# Altium footprint library AVP32F335_EVM_Rev1.0.PcbLib: 50 footprints (part 2 of 4)
Each footprint in its own frame and in the unit in brackets; x right, y up, seen from the top. Pads: shape width x height; smd on the part's side, far side on the other; paste and mask are expansions set on the pad; w line width, h text height; cw(c..) or ccw(c..) is an arc to the next point about the centre after c.
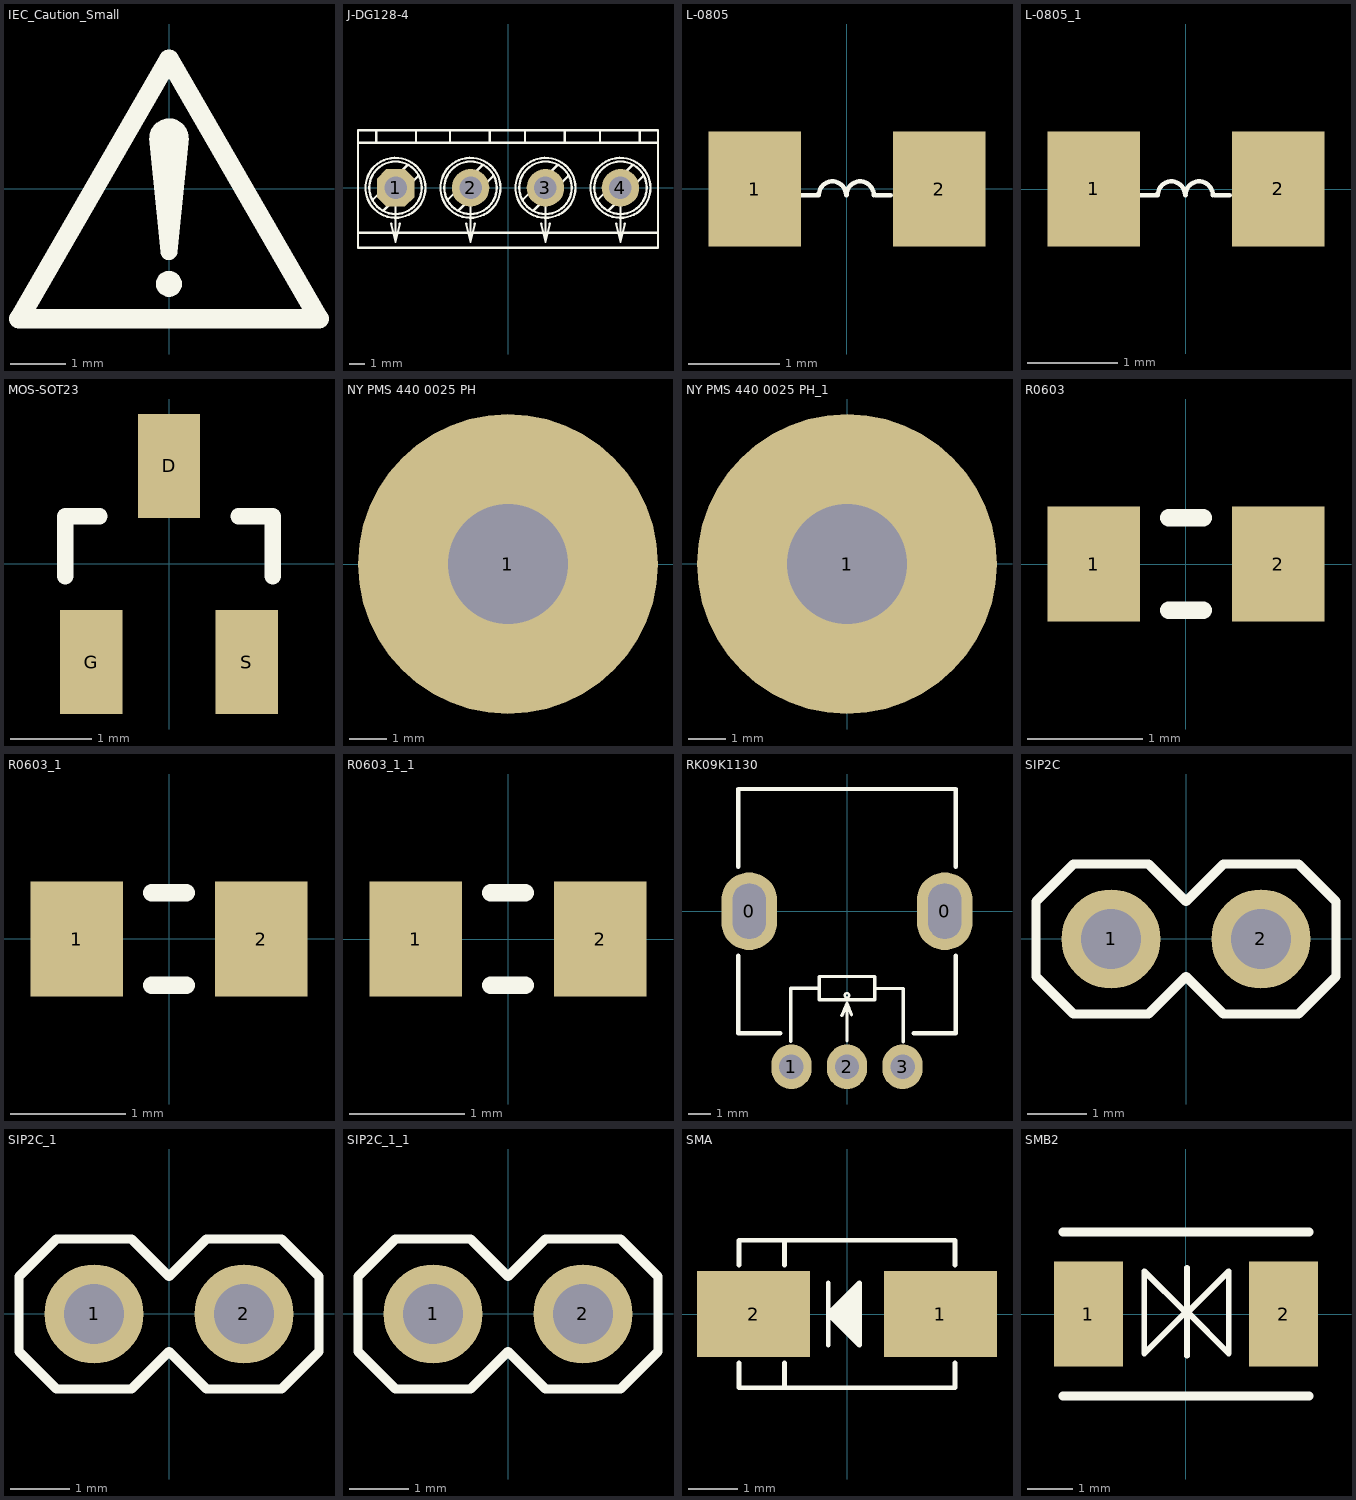
[diagram p1: the footprints below, top view; thin cyan lines are the x and y axes]

## IEC_Caution_Small [mm]
Top Overlay:
  circle w0.254: c0,-1.727 r0.108
  circle w0.356: c0,0.914 r0.178
  circle w0.254: c0,-1.143 r0.025
  region: -0.356,0.914 0.356,0.914 0.152,-1.143 -0.152,-1.143
  lines w0.356: -2.718,-2.362 0,2.345 2.718,-2.362 -2.718,-2.362

## J-DG128-4 [mm]
pads (4):
  oct 2.5x2.5 hole 1.5: 1(-7.5,0)
  round 2.5 hole 1.5: 2(-2.5,0) 3(2.5,0) 4(7.5,0)
Top Overlay:
  circle w0.15: c7.5,0 r2
  circle w0.15: c7.5,0 r1.75
  circle w0.15: c2.5,0 r1.75
  circle w0.15: c2.5,0 r2
  circle w0.15: c-7.5,0 r1.75
  circle w0.15: c-7.5,0 r2
  circle w0.15: c-2.5,0 r1.75
  circle w0.15: c-2.5,0 r2
  lines w0.15: -10,-3 10,-3 ; -10,3 10,3 ; -9.013,-0.791 -6.702,1.52 ; -8.781,3 -8.781,3.839 ; -8.298,-1.52 -5.987,0.791 ; -7.79,-2.389 -7.5,-3.594 ; -7.5,0 -7.5,-3.594 ; -7.21,-2.389 -7.5,-3.594 ; -6.139,3 -6.139,3.839 ; -4.013,-0.791 -1.702,1.52 ; -3.861,3 -3.861,3.839 ; -3.298,-1.52 -0.987,0.791 ; -2.79,-2.389 -2.5,-3.594 ; -2.5,0 -2.5,-3.594 ; -2.21,-2.389 -2.5,-3.594 ; -1.219,3 -1.219,3.839 ; 0.987,-0.791 3.298,1.52 ; 1.139,3 1.139,3.839 ; 1.702,-1.52 4.013,0.791 ; 2.21,-2.389 2.5,-3.594 ; 2.5,0 2.5,-3.594 ; 2.79,-2.389 2.5,-3.594 ; 3.781,3 3.781,3.839 ; 5.987,-0.791 8.298,1.52 ; 6.139,3 6.139,3.839 ; 6.702,-1.52 9.013,0.791 ; 7.21,-2.389 7.5,-3.594 ; 7.5,0 7.5,-3.594 ; 7.79,-2.389 7.5,-3.594 ; 8.781,3 8.781,3.839 ; -10,-4 -10,3.839 10,3.839 10,-4 -10,-4
3D body "SW3dPS-KRM4.STEP": height 10, standoff -4, extent -10,-3.586 10,3.914

## L-0805 [mil] "标准型  间距40mil 电感"
height 196.85
pads (2):
  rect 40x50 smd: 1(-40,0) 2(40,0)
Top Overlay:
  lines w1.97: -20,-2.61 -13,-2.61 ; -12.22,-2.62 cw(c-6.32,-2.62) -0.41,-2.62 ; -0.22,-2.62 cw(c5.68,-2.62) 11.59,-2.62 ; 12.53,-2.61 19,-2.61
3D body "User Library-Ferrite Beads(BLM21PG221SZ1D).step": height 36.42, standoff 2.95, extent -39.36,-25.6 39.37,23.61

## L-0805_1 [mil] "标准型  间距40mil 电感"
height 196.85
pads (2):
  rect 40x50 smd: 1(-40,0) 2(40,0)
Top Overlay:
  lines w1.97: -20,-2.61 -13.01,-2.61 ; -12.22,-2.62 cw(c-6.32,-2.62) -0.41,-2.62 ; -0.22,-2.62 cw(c5.68,-2.62) 11.59,-2.62 ; 12.53,-2.61 19,-2.61
3D body "User Library-Ferrite Beads(BLM21PG221SZ1D).step": height 36.42, standoff 2.95, extent -39.37,-25.6 39.37,23.61

## MOS-SOT23 [mm] "焊盘加长型"
height 2
pads (3):
  rect 0.762x1.27 smd: D(0,1.2) G(-0.95,-1.2) S(0.95,-1.2)
Top Overlay:
  lines w0.2: -1.27,-0.15 -1.27,0.584 -0.85,0.584 ; 0.85,0.584 1.27,0.584 1.27,-0.15
3D body "SOT-23-3.STEP": height 1.2, standoff 0, extent -1.45,-1.502 1.45,1.298

## NY PMS 440 0025 PH [mm] "4-40 nylon screw and mounting hole"
height 1.905
pads (1):
  round 8 hole 3.2: 1(12,0)

## NY PMS 440 0025 PH_1 [mm] "4-40 nylon screw and mounting hole"
height 1.905
pads (1):
  round 8 hole 3.2: 1(0,0)
Mechanical 5:
  circle w0.127: c0,0 r3.789
3D body: height 2.69, standoff -8.74, extent -3.302,-3.3 3.296,3.3

## R0603 [mm] "无丝印 脚距1.6mm  0.8/1mm 焊盘"
height 1.2
pads (2):
  rect 0.8x1 smd mask+0.051: 1(-0.8,0) 2(0.8,0)
Top Overlay:
  lines w0.152: -0.15,-0.4 0.15,-0.4 ; -0.15,0.4 0.15,0.4
3D body "RES-0603.step": height 0.43, standoff -0.03, extent -0.786,-0.4 0.814,0.4

## R0603_1 [mm] "无丝印 脚距1.6mm  0.8/1mm 焊盘"
height 1.2
pads (2):
  rect 0.8x1 smd: 1(-0.8,0) 2(0.8,0)
Top Overlay:
  lines w0.152: -0.15,-0.4 0.15,-0.4 ; -0.15,0.4 0.15,0.4
3D body "RES-0603.step": height 0.43, standoff -0.03, extent -0.786,-0.4 0.814,0.4

## R0603_1_1 [mm] "无丝印 脚距1.6mm  0.8/1mm 焊盘"
height 1.2
pads (2):
  rect 0.8x1 smd: 1(-0.8,0) 2(0.8,0)
Top Overlay:
  lines w0.152: -0.15,-0.4 0.15,-0.4 ; -0.15,0.4 0.15,0.4
3D body "RES-0603.step": height 0.43, standoff -0.03, extent -0.786,-0.4 0.814,0.4

## RK09K1130 [mm] "立式可调电位器"
height 9.5
pads (5):
  oval 2.5x3.5 hole 1.5 slot 2.5 at 90 deg: 0(-4.4,0) 0(4.4,0)
  oval 1.8x2 hole 1.1: 1(-2.5,-7) 2(0,-7) 3(2.5,-7)
Top Overlay:
  circle w0.1: c-0.002,-3.784 r0.1
  lines w0.15: -2.525,-5.857 -2.525,-3.469 -1.247,-3.469 -1.247,-2.941 1.243,-2.941 1.243,-3.982 -1.247,-3.982 -1.247,-3.474 ; -0.231,-4.693 -0.002,-4.135 ; -0.002,-5.836 -0.002,-4.135 ; 0.201,-4.668 -0.002,-4.135 ; 1.243,-3.474 2.538,-3.474 ; 2.529,-5.882 2.529,-3.495
  lines w0.2: -4.9,-2 -4.9,-5.5 -3,-5.5 ; -4.9,2 -4.9,5.5 4.863,5.5 4.877,5.486 4.886,5.486 4.9,5.5 4.9,2 ; 3,-5.5 4.9,-5.5 4.9,-2
3D body "User Library-RK09K1130-20-1.step": height 19.5, standoff -4.2, extent -5.698,-7.152 5.698,5.498

## SIP2C [mil] "带短路帽"
height 47.24
pads (2):
  round 66 hole 40 paste-4: 1(-50,0) 2(50,0)
Top Overlay:
  lines w6: -100,-25 -75,-50 -25,-50 0,-25 25,-50 75,-50 100,-25 100,25 75,50 25,50 0,25 -25,50 -75,50 -100,25 -100,-25
Mechanical 16:
  rectangle: -60,-10 -40,10
  rectangle: 40,-10 60,10
3D body "User Library-PLD-2.step": height 336.22, standoff -118.11, extent -100,-50 100,50
3D body "SNT-100-XX-X.stp": height 344, standoff 104, extent -100,-52.1 100,48

## SIP2C_1 [mil] "带短路帽"
height 47.24
pads (2):
  round 66 hole 40: 1(-50,0) 2(50,0)
Top Overlay:
  lines w6: -100,-25 -100,25 -75,50 -25,50 0,25 25,50 75,50 100,25 100,-25 75,-50 25,-50 0,-25 -25,-50 -75,-50 -100,-25
Mechanical 16:
  rectangle: 40,-10 60,10
  rectangle: -60,-10 -40,10
3D body "SNT-100-XX-X.stp": height 344, standoff 104, extent -100,-52.1 100,48
3D body "User Library-PLD-2.step": height 336.22, standoff -118.11, extent -100,-50 100,50

## SIP2C_1_1 [mil] "带短路帽"
height 47.24
pads (2):
  round 66 hole 40: 1(-50,0) 2(50,0)
Top Overlay:
  lines w6: -100,-25 -100,25 -75,50 -25,50 0,25 25,50 75,50 100,25 100,-25 75,-50 25,-50 0,-25 -25,-50 -75,-50 -100,-25
Mechanical 16:
  rectangle: 40,-10 60,10
  rectangle: -60,-10 -40,10
3D body "SNT-100-XX-X.stp": height 344, standoff 104, extent -100,-52.1 100,48
3D body "User Library-PLD-2.step": height 336.22, standoff -118.11, extent -100,-50 100,50

## SMA [mm] "DO-214AC"
height 8
pads (2):
  rect 2.3x1.75 smd: 1(1.9,0) 2(-1.9,0)
Top Overlay:
  lines w0.1: -2.2,-1 -2.2,-1.5 2.2,-1.5 2.2,-1 ; -2.2,1 -2.2,1.5 2.2,1.5 2.2,1 ; -1.27,-1.5 -1.27,-1 ; -1.27,1 -1.27,1.5 ; -0.381,-0.635 -0.381,0.635 ; -0.381,-0.025 -0.087,-0.025 ; -0.381,0.051 0.071,0.051 ; -0.193,-0.188 -0.193,0.188 ; -0.168,-0.213 -0.168,0.213 ; -0.087,-0.294 -0.086,0.294 ; -0.011,-0.37 -0.011,0.37 ; 0.049,-0.43 0.049,0.43 ; 0.096,-0.477 0.096,0.477 0.183,0.477 0.183,-0.564 ; -0.381,0 0.254,0.635 0.254,-0.635 -0.381,0
3D body "DO-214AC.STEP": height 2.4, standoff 0, extent -2.3,-1.372 2.3,1.328

## SMB2 [mm] "双向TVS"
pads (2):
  rect 1.52x2.3 smd: 1(-2.14,0) 2(2.14,0)
Top Overlay:
  lines w0.127: 0,0.025 -0.914,0.94 -0.914,-0.864 0,0.051 ; 0.025,-0.914 0.025,1.016 ; 0.025,0.025 0.939,0.94 0.939,-0.864 0.025,0.051
  lines w0.2: -2.7,-1.8 2.7,-1.8 ; -2.7,1.8 2.7,1.8
3D body "User Library-DO-214AA SMB.step": height 2.3, standoff 0, extent -2.7,-1.8 2.7,1.8